# Altium footprint library LimeMicroAltiumLib.PcbLib: 876 footprints (part 11 of 57)
Each footprint in its own frame and in the unit in brackets; x right, y up, seen from the top. Pads: shape width x height; smd on the part's side, far side on the other; paste and mask are expansions set on the pad; w line width, h text height; cw(c..) or ccw(c..) is an arc to the next point about the centre after c.
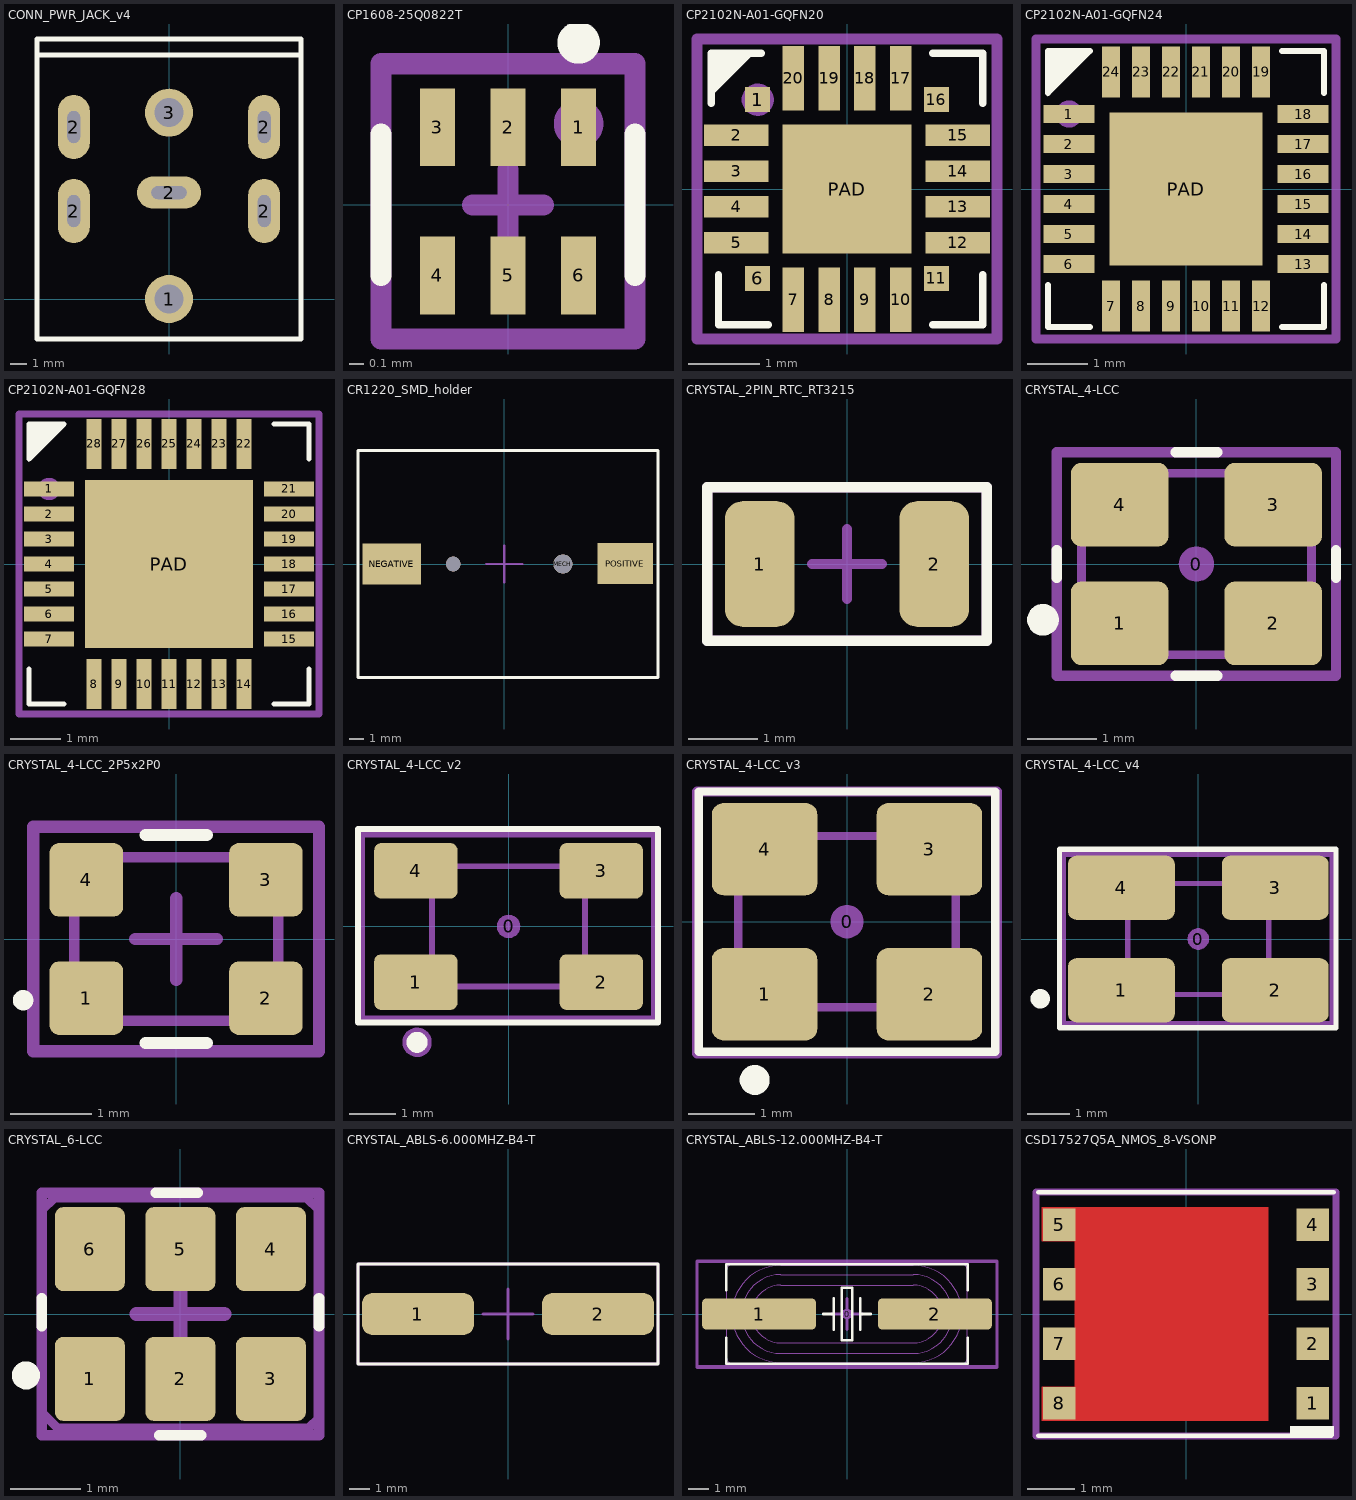
[diagram p10: the footprints below, top view; thin cyan lines are the x and y axes]

## CONN_PWR_JACK_v4 [mm]
pads (7):
  round 3 hole 1.8: 1(0,0) 3(0,11.65)
  oval 2x4 hole 0.8 slot 2 at 90 deg: 2(-5.95,5.5) 2(-5.95,10.75) 2(5.95,5.5) 2(5.95,10.75)
  oval 4x2 hole 0.8 slot 2.2 at 0 deg: 2(0,6.65)
Top Overlay:
  lines w0.3: -8.25,15.25 8.25,15.25 ; -8.25,-2.5 -8.25,16.25 8.25,16.25 8.25,-2.5 -8.25,-2.5
Mechanical 15:
  lines w0.15: -8.25,-2.5 -8.25,16.25 8.25,16.25 8.25,-2.5 -8.25,-2.5
  text ".designator" at 0,6.6 h0.55

## CP1608-25Q0822T [mm]
pads (6):
  rect 0.25x0.55 smd mask+0.05: 1(0.5,0.55) 2(0,0.55) 3(-0.5,0.55) 4(-0.5,-0.5) 5(0,-0.5) 6(0.5,-0.5)
Top Overlay:
  circle w0.25: c0.5,1.15 r0.025
  lines w0.15: -0.9,-0.5 -0.9,0.5 ; 0.9,-0.5 0.9,0.5
Mechanical 15:
  circle w0.3: c0.5,0.575 r0.025
  lines w0.15: -0.25,0 0.25,0 ; 0,-0.25 0,0.25 ; -0.9,-0.95 -0.9,1 0.9,1 0.9,-0.95 -0.9,-0.95
  text ".Designator" at 0,0 h0.55
3D body: height 0.6, standoff 0, extent -0.8,-0.4 0.8,0.4
3D body: height 0.6, standoff 0, extent 0.463,-0.075 0.663,0.15
3D body: height 0.6, standoff 0, extent -0.65,-0.425 -0.35,-0.275
3D body: height 0.6, standoff 0, extent -0.15,-0.425 0.15,-0.275
3D body: height 0.6, standoff 0, extent 0.35,-0.425 0.65,-0.275
3D body: height 0.6, standoff 0, extent 0.35,0.275 0.65,0.425
3D body: height 0.6, standoff 0, extent -0.15,0.275 0.15,0.425
3D body: height 0.6, standoff 0, extent -0.65,0.275 -0.35,0.425

## CP2102N-A01-GQFN20 [mm]
pads (21):
  rect 0.35x0.35 smd mask+0.05: 1(-1.25,1.25) 6(-1.25,-1.25) 11(1.25,-1.25) 16(1.25,1.25)
  rect 0.9x0.3 smd mask+0.05: 2(-1.55,0.75) 3(-1.55,0.25) 4(-1.55,-0.25) 5(-1.55,-0.75) 12(1.55,-0.75) 13(1.55,-0.25) 14(1.55,0.25) 15(1.55,0.75)
  rect 0.3x0.9 smd mask+0.05: 7(-0.75,-1.55) 8(-0.25,-1.55) 9(0.25,-1.55) 10(0.75,-1.55) 17(0.75,1.55) 18(0.25,1.55) 19(-0.25,1.55) 20(-0.75,1.55)
  rect 1.8x1.8 smd mask+0.05: PAD(0,0)
Top Overlay:
  region: -1.9,1.3 -1.3,1.9 -1.9,1.9
  lines w0.1: -1.9,1.2 -1.9,1.9 -1.2,1.9 ; -1.8,-1.2 -1.8,-1.9 -1.1,-1.9 ; 1.2,-1.9 1.9,-1.9 1.9,-1.2 ; 1.2,1.9 1.9,1.9 1.9,1.2
Mechanical 15:
  circle w0.25: c-1.25,1.25 r0.1
  lines w0.15: -0.5,0 0.5,0 ; 0,-0.5 0,0.5 ; -2.1,-2.1 2.1,-2.1 2.1,2.1 -2.1,2.1 -2.1,-2.1
  text ".Designator" at 0,0 h0.55
3D body "SW3dPS-QFN-20.STEP": height 0.62, standoff -0.08, extent -1.5,-1.5 1.5,1.5

## CP2102N-A01-GQFN24 [mm]
pads (25):
  rect 0.85x0.3 smd mask+0.05: 1(-1.95,1.25) 2(-1.95,0.75) 3(-1.95,0.25) 4(-1.95,-0.25) 5(-1.95,-0.75) 6(-1.95,-1.25) 13(1.95,-1.25) 14(1.95,-0.75) 15(1.95,-0.25) 16(1.95,0.25) 17(1.95,0.75) 18(1.95,1.25)
  rect 0.3x0.85 smd mask+0.05: 7(-1.25,-1.95) 8(-0.75,-1.95) 9(-0.25,-1.95) 10(0.25,-1.95) 11(0.75,-1.95) 12(1.25,-1.95) 19(1.25,1.95) 20(0.75,1.95) 21(0.25,1.95) 22(-0.25,1.95) 23(-0.75,1.95) 24(-1.25,1.95)
  rect 2.55x2.55 smd mask+0.05: PAD(0,0)
Top Overlay:
  region: -2.3,1.55 -1.55,2.3 -2.3,2.3
  lines w0.1: -2.3,-1.6 -2.3,-2.3 -1.6,-2.3 ; 1.6,-2.3 2.3,-2.3 2.3,-1.6 ; 1.6,2.3 2.3,2.3 2.3,1.6 ; -2.3,1.6 -1.6,2.3 -2.3,2.3 -2.3,1.6
Mechanical 15:
  circle w0.25: c-1.95,1.25 r0.1
  lines w0.15: -0.5,0 0.5,0 ; 0,-0.5 0,0.5 ; -2.5,-2.5 -2.5,2.5 2.5,2.5 2.5,-2.5 -2.5,-2.5
  text ".Designator" at 0,0 h0.55
3D body "User Library-QFN 24 4x4.step": height 0.9, standoff 0, extent -2.002,-2.002 2.002,2.002

## CP2102N-A01-GQFN28 [mm]
pads (29):
  rect 1x0.3 smd mask+0.05: 1(-2.4,1.5) 2(-2.4,1) 3(-2.4,0.5) 4(-2.4,0) 5(-2.4,-0.5) 6(-2.4,-1) 7(-2.4,-1.5) 15(2.4,-1.5) 16(2.4,-1) 17(2.4,-0.5) 18(2.4,0) 19(2.4,0.5) 20(2.4,1) 21(2.4,1.5)
  rect 0.3x1 smd mask+0.05: 8(-1.5,-2.4) 9(-1,-2.4) 10(-0.5,-2.4) 11(0,-2.4) 12(0.5,-2.4) 13(1,-2.4) 14(1.5,-2.4) 22(1.5,2.4) 23(1,2.4) 24(0.5,2.4) 25(0,2.4) 26(-0.5,2.4) 27(-1,2.4) 28(-1.5,2.4)
  rect 3.35x3.35 smd mask+0.05: PAD(0,0)
Top Overlay:
  region: -2.8,2.05 -2.05,2.8 -2.8,2.8
  lines w0.1: -2.8,-2.1 -2.8,-2.8 -2.1,-2.8 ; 2.1,-2.8 2.8,-2.8 2.8,-2.1 ; 2.1,2.8 2.8,2.8 2.8,2.1 ; -2.8,2.1 -2.1,2.8 -2.8,2.8 -2.8,2.1
Mechanical 15:
  circle w0.25: c-2.4,1.5 r0.1
  lines w0.15: -0.5,0 0.5,0 ; 0,-0.5 0,0.5 ; -3,-3 -3,3 3,3 3,-3 -3,-3
  text ".Designator" at 0,0 h0.55
3D body "User Library-QFN28-0_5.STEP": height 1, standoff 0, extent -2.5,-2.5 2.5,2.5

## CR1220_SMD_holder [mm]
pads (4):
  round 1 hole 1 unplated mask+0.05: MECH(-3.5,0)
  round 1.3 hole 1.3 unplated mask+0.05: MECH(4,0)
  rect 4x2.8 smd mask+0.05: NEGATIVE(-7.7,0)
  rect 3.8x2.8 smd mask+0.05: POSITIVE(8.275,0.025)
Top Overlay:
  lines w0.2: -10,-7.75 10.5,-7.75 10.5,7.75 -10,7.75 -10,-7.75
Mechanical 15:
  lines w0.15: -1.25,0 1.25,0 ; 0,-1.25 0,1.25 ; -10,-7.75 10.5,-7.75 10.5,7.75 -10,7.75 -10,-7.75
  text ".Designator" at 0,0 h0.55
  text "NEGATIVE / TERMINAL" at -9.5,-1 h0.55
  text "POSITIVE / TERMINAL" at 6,-1 h0.55
3D body "User Library-cr1220.STEP": height 3.94, standoff -1, extent -8.75,-7.497 9.75,7.5

## CRYSTAL_2PIN_RTC_RT3215 [mm]
pads (2):
  rrect50% 1x1.8 smd mask+0.05: 1(-1.25,0) 2(1.25,0)
Top Overlay:
  lines w0.15: -2,-1.1 2,-1.1 2,1.1 -2,1.1 -2,-1.1
Mechanical 15:
  circle w0.2: c-1.3,0 r0.1
  lines w0.15: -0.5,0 0,0 ; 0,-0.5 0,0 ; 0,0.5 0,0 ; 0.5,0 0,0 ; -2,-1.1 2,-1.1 2,1.1 -2,1.1 -2,-1.1
  text ".Designator" at 0,0 h0.55
3D body "User Library-ABS07.STEP": height 0.91, standoff 0, extent -1.61,-0.76 1.61,0.76

## CRYSTAL_4-LCC [mm] "SMD Crystal 4-lead leadless package"
height 0.8
pads (5):
  round 0.508 on Mech15: 0(0,0)
  rrect25% 1.4x1.2 smd: 1(-1.1,-0.85) 2(1.1,-0.85) 3(1.1,0.85) 4(-1.1,0.85)
Top Overlay:
  circle w0.254: c-2.2,-0.8 r0.1
  lines w0.15: -2,-0.2 -2,0.2 ; -0.3,-1.6 0.3,-1.6 ; -0.3,1.6 0.3,1.6 ; 2,-0.2 2,0.2
Mechanical 13:
  lines w0.127: -1.65,-1.143 -1.493,-1.3 1.493,-1.3 1.65,-1.143 1.65,1.144 1.494,1.3 -1.493,1.3 -1.65,1.143 -1.65,-1.143
Mechanical 15:
  circle w0.35: c-1.4,-1.1 r0.141
  lines w0.15: -2,-1.6 2,-1.6 2,1.6 -2,1.6 -2,-1.6
  text ".Designator" at 0,0 h0.55
3D body "Crystal TXC Corp 7M series.STEP": height 0.8, standoff 0, extent -1.65,-1.3 1.65,1.3

## CRYSTAL_4-LCC_2P5x2P0 [mm] "SMD Crystal 4-lead leadless package 2.5x2.0 mm"
height 0.8
pads (4):
  rrect25% 0.9x0.9 smd: 1(-1.1,-0.725) 2(1.1,-0.725) 3(1.1,0.725) 4(-1.1,0.725)
Top Overlay:
  circle w0.15: c-1.875,-0.75 r0.05
  lines w0.15: -0.375,-1.275 0.375,-1.275 ; -0.375,1.275 0.375,1.275
Mechanical 13:
  lines w0.127: -1.25,-1 -1.25,1 1.25,1 1.25,-1 -1.25,-1
Mechanical 15:
  circle w0.2: c-1.175,-0.65 r0.056
  lines w0.15: -0.5,0 0,0 ; 0,-0.5 0,0 ; 0,0.5 0,0 ; 0.5,0 0,0 ; -1.75,-1.375 -1.75,1.375 1.75,1.375 1.75,-1.375 -1.75,-1.375
  text ".Designator" at 0,0 h0.55
3D body "User Library-ASDK_series_ABRACON.step": height 0.95, standoff 0, extent -1.25,-1 1.25,1

## CRYSTAL_4-LCC_v2 [mm] "SMD Crystal 4-lead leadless package"
height 0.8
pads (5):
  round 0.508 on Mech15: 0(0,0)
  rrect25% 1.8x1.2 smd: 1(-2,-1.2) 2(2,-1.2) 3(2,1.2) 4(-2,1.2)
Top Overlay:
  circle w0.254: c-1.975,-2.5 r0.1
  lines w0.127: -3.25,-2.075 -3.25,2.1 3.225,2.1 3.225,-2.075 -3.25,-2.075
Mechanical 13:
  lines w0.127: -1.65,-1.143 -1.493,-1.3 1.493,-1.3 1.65,-1.143 1.65,1.144 1.494,1.3 -1.493,1.3 -1.65,1.143 -1.65,-1.143
Mechanical 15:
  circle w0.35: c-1.975,-2.5 r0.141
  lines w0.15: -3.175,-2 3.15,-2 3.15,2 -3.175,2 -3.175,-2
  text ".Designator" at 0,0 h0.55
3D body "Crystal TXC Corp 7M series.STEP": height 0.8, standoff 0, extent -1.65,-1.3 1.65,1.3

## CRYSTAL_4-LCC_v3 [mm] "SMD Crystal 4-lead leadless package"
height 0.8
pads (5):
  round 0.508 on Mech15: 0(0,0)
  rrect25% 1.6x1.4 smd: 1(-1.25,-1.1) 2(1.25,-1.1) 3(1.25,1.1) 4(-1.25,1.1)
Top Overlay:
  circle w0.254: c-1.4,-2.4 r0.1
  lines w0.127: -2.25,-1.975 2.25,-1.975 2.25,1.975 -2.25,1.975 -2.25,-1.975
Mechanical 13:
  lines w0.127: -1.65,-1.143 -1.65,1.143 -1.493,1.3 1.494,1.3 1.65,1.144 1.65,-1.143 1.493,-1.3 -1.493,-1.3 -1.65,-1.143
Mechanical 15:
  circle w0.35: c-1.5,-1.3 r0.141
  lines w0.15: -2.275,-2 -2.275,1.975 2.275,1.975 2.275,-2 -2.275,-2
  text ".Designator" at 0,0 h0.55
3D body "Crystal TXC Corp 7M series.STEP": height 0.8, standoff 0, extent -1.65,-1.3 1.65,1.3

## CRYSTAL_4-LCC_v4 [mm] "SMD Crystal 4-lead leadless package"
height 0.8
pads (5):
  round 0.508 on Mech15: 0(0,0)
  rrect25% 2.5x1.5 smd: 1(-1.8,-1.2) 2(1.8,-1.2) 3(1.8,1.2) 4(-1.8,1.2)
Top Overlay:
  circle w0.254: c-3.7,-1.4 r0.1
  lines w0.127: -3.25,-2.075 -3.25,2.1 3.225,2.1 3.225,-2.075 -3.25,-2.075
Mechanical 13:
  lines w0.127: -1.65,-1.143 -1.493,-1.3 1.493,-1.3 1.65,-1.143 1.65,1.144 1.494,1.3 -1.493,1.3 -1.65,1.143 -1.65,-1.143
Mechanical 15:
  circle w0.35: c-2.2,-1.3 r0.141
  lines w0.15: -3.175,-2 3.15,-2 3.15,2 -3.175,2 -3.175,-2
  text ".Designator" at 0,0 h0.55
3D body "User Library-Crystal.step": height 0.9, standoff -0.05, extent -2.5,-1.6 2.5,1.6

## CRYSTAL_6-LCC [mm] "SMD Crystal 6-lead leadless package"
height 0.8
pads (6):
  rrect25% 1x1.2 smd: 1(-1.29,-0.925) 2(0,-0.925) 3(1.29,-0.925) 4(1.29,0.925) 5(0,0.925) 6(-1.29,0.925)
Top Overlay:
  circle w0.2: c-2.2,-0.875 r0.1
  lines w0.15: -1.975,-0.175 -1.975,0.225 ; -0.35,1.725 0.25,1.725 ; -0.3,-1.725 0.3,-1.725 ; 1.975,-0.175 1.975,0.225
Mechanical 13:
  lines w0.127: -1.975,-1.4 -1.75,-1.625 1.825,-1.625 1.975,-1.475 1.975,1.475 1.8,1.65 -1.8,1.65 -1.975,1.475 -1.975,-1.4
Mechanical 15:
  lines w0.15: -1.975,-1.725 1.975,-1.725 1.975,1.725 -1.975,1.725 -1.975,-1.725
  lines w0.2: -0.625,0 0,0 ; 0,-0.625 0,0 ; 0,0.625 0,0 ; 0.625,0 0,0
  lines w0.3: -1.185,-0.907 ccw(c-1.279,-0.922) -1.184,-0.925
  text ".Designator" at 0,0 h0.55
3D body "User Library-SG310.SLDPRT": height 1.05, standoff 0, extent -1.6,-1.225 1.6,1.275

## CRYSTAL_ABLS-6.000MHZ-B4-T [mm]
pads (2):
  rrect50% 5.6x2.1 smd mask+0.05: 1(-4.5,0) 2(4.5,0)
Top Overlay:
  lines w0.15: -7.5,-2.5 7.5,-2.5 7.5,2.5 -7.5,2.5 -7.5,-2.5
Mechanical 15:
  lines w0.15: -1.25,0 0,0 ; 0,-1.25 0,0 ; 0,1.25 0,0 ; 1.25,0 0,0 ; -7.5,-2.5 7.5,-2.5 7.5,2.5 -7.5,2.5 -7.5,-2.5
  text ".Designator" at 0,0 h0.55
3D body "ABLS-6.000MHZ-B4-T--3DModel-STEP-400430.STEP": height 4.06, standoff -0.1, extent -6.35,-2.349 6.35,2.35

## CRYSTAL_ABLS-12.000MHZ-B4-T [mm] "SMD Crystal ABLS-12.000MHZ-B4-T package"
height 4.3
pads (3):
  round 0.508 on Mech14: 0(0,0)
  rrect25% 5.5x1.5 smd: 1(-4.25,0) 2(4.25,0)
Top Overlay:
  lines w0.127: -5.842,-1.143 -5.842,-2.413 5.842,-2.413 5.842,-1.143 ; -5.842,1.143 -5.842,2.413 5.842,2.413 5.842,1.143 ; -1.143,0 -0.635,0 ; -0.635,-0.762 -0.635,0.762 ; 0.635,-0.762 0.635,0.762 ; 0.635,0 1.143,0 ; -0.254,-1.27 0.254,-1.27 0.254,1.27 -0.254,1.27 -0.254,-1.27
Mechanical 13:
  lines w0.05: -5.8,-0.45 -6.4,-0.45 -6.4,0.45 -5.8,0.45 ; 5.8,-0.45 6.4,-0.45 6.4,0.45 5.8,0.45 ; -5.8,-2.165 ccw(c-5.55,-2.165) -5.55,-2.415 5.55,-2.415 ccw(c5.55,-2.165) 5.8,-2.165 5.8,2.165 ccw(c5.55,2.165) 5.55,2.415 -5.55,2.415 ccw(c-5.55,2.165) -5.8,2.165 -5.8,-2.165 ; -3.2,-2.35 cw(c-3.2,0) -3.2,2.35 3.2,2.35 cw(c3.2,0) 3.2,-2.35 -3.2,-2.35 ; -3.2,-1.9 cw(c-3.2,0) -3.2,1.9 3.2,1.9 cw(c3.2,0) 3.2,-1.9 -3.2,-1.9 ; -3.2,-1.4 cw(c-3.2,0) -3.2,1.4 3.2,1.4 cw(c3.2,0) 3.2,-1.4 -3.2,-1.4
Mechanical 14:
  lines w0.127: -7.239,-2.54 7.239,-2.54 7.239,2.54 -7.239,2.54 -7.239,-2.54
Mechanical 15:
  lines w0.15: -0.75,0 0,0 ; 0,-0.75 0,0 ; 0,0.75 0,0 ; 0.75,0 0,0 ; -7.25,-2.575 -7.25,2.55 7.25,2.55 7.25,-2.575 -7.25,-2.575
  text ".Designator" at 0,0 h0.55
3D body "Crystal HC49_US-SM.STEP": height 4.29, standoff -0.01, extent -6.4,-2.415 6.4,2.415

## CSD17527Q5A_NMOS_8-VSONP [mm]
height 1.7
pads (8):
  rect 0.7x0.7 smd: 1(2.705,-1.905) 2(2.705,-0.635) 3(2.705,0.635) 4(2.705,1.905) 5(-2.705,1.905) 6(-2.705,0.635) 7(-2.705,-0.635) 8(-2.705,-1.905)
Top Layer:
  region: -3.075,-1.55 -2.375,-1.55 -2.375,1.55 -3.075,1.55 -3.075,2.275 1.75,2.275 1.75,-2.275 -3.075,-2.275
Top Overlay:
  region: 3.15,-2.6 3.15,-2.4 2.225,-2.4 2.225,-2.6
  lines w0.1: -3.15,-2.6 3.1,-2.6 ; -3.15,2.6 3.15,2.6
Top Paste:
  region: -1.8,1.775 -1.8,0.275 -0.3,0.275 -0.3,1.775
  region: -1.8,-1.775 -1.8,-0.275 -0.3,-0.275 -0.3,-1.775
  region: 0.1,1.775 1.3,1.775 1.3,0.275 0.1,0.275
  region: 0.1,-1.775 1.3,-1.775 1.3,-0.275 0.1,-0.275
Top Solder:
  region: 1.85,-2.35 1.85,2.35 -2.45,2.35 -2.45,-2.35
Mechanical 15:
  circle w0.15: c2.7,-1.9 r0.075
  lines w0.15: -0.5,0 0.5,0 ; 0,-0.5 0,0.5 ; -3.2,-2.6 -3.2,2.6 3.2,2.6 3.2,-2.6 -3.2,-2.6
  text ".Designator" at 0,0 h0.55
3D body "User Library-VSON-8.step": height 1, standoff 0, extent -3.002,-2.5 3,2.5